# Altium footprint library Connectors.PcbLib: 305 footprints (part 9 of 20)
Each footprint in its own frame and in the unit in brackets; x right, y up, seen from the top. Pads: shape width x height; smd on the part's side, far side on the other; paste and mask are expansions set on the pad; w line width, h text height; cw(c..) or ccw(c..) is an arc to the next point about the centre after c.
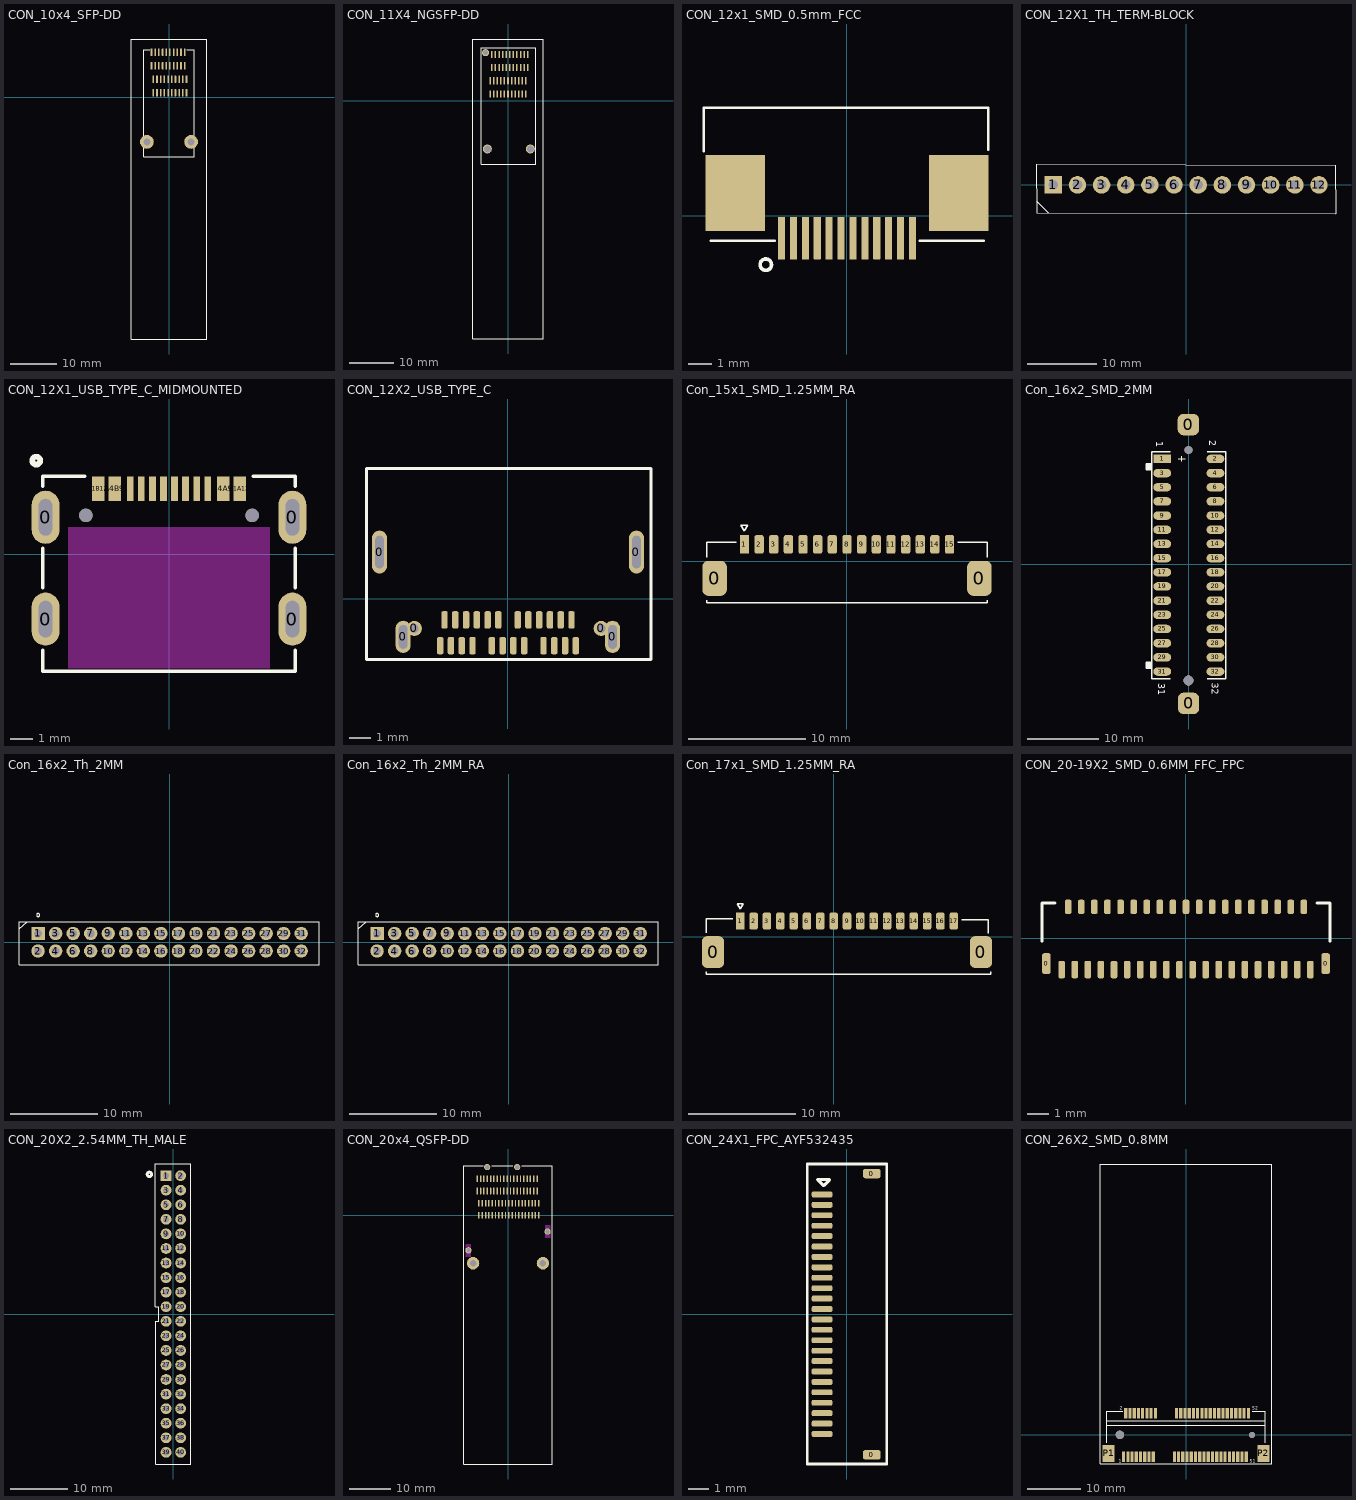
[diagram p8: the footprints below, top view; thin cyan lines are the x and y axes]

## CON_10x4_SFP-DD [mm] "/20220602/V-A.Patino"
pads (42):
  rrect50% 0.35x1.6 smd: 1(-3.4,0.93) 2(-2.6,0.93) 3(-1.8,0.93) 4(-1,0.93) 5(-0.2,0.93) 6(0.6,0.93) 7(1.4,0.93) 8(2.2,0.93) 9(3,0.93) 10(3.8,0.93) 11(3.4,9.72) 12(2.6,9.72) 13(1.8,9.72) 14(1,9.72) 15(0.2,9.72) 16(-0.6,9.72) 17(-1.4,9.72) 18(-2.2,9.72) 19(-3,9.72) 20(-3.8,9.72) 21(-3.4,3.86) 22(-2.6,3.86) 23(-1.8,3.86) 24(-1,3.86) 25(-0.2,3.86) 26(0.6,3.86) 27(1.4,3.86) 28(2.2,3.86) 29(3,3.86) 30(3.8,3.86) 31(3.4,6.79) 32(2.6,6.79) 33(1.8,6.79) 34(1,6.79) 35(0.2,6.79) 36(-0.6,6.79) 37(-1.4,6.79) 38(-2.2,6.79) 39(-3,6.79) 40(-3.8,6.79)
  round 3 hole 1.55: ""(-4.8,-9.72) ""(4.8,-9.72)
Top Overlay:
  lines w0.152: -5.5,-12.92 -5.5,10.29 -4.2,10.29 ; -5.495,-12.925 5.5,-12.925 ; 3.865,10.29 5.5,10.29 5.5,-12.92 ; -8.2,-52.5 -8.2,12.6 8.2,12.6 8.2,-52.5 -8.2,-52.5
3D body "c-2325864-1-10-3d.stp": height 7.37, standoff -1, extent -5.5,-12.925 5.5,10.435
3D body "c-2335809-1-a-3d.stp": height 11.86, standoff -2.04, extent -8.174,-52.497 8.174,12.578

## CON_11X4_NGSFP-DD [mm] "20220602 / E.Naranjo"
pads (47):
  rrect50% 0.35x1.6 smd: 1(-3.2,1.55) 2(-2.4,1.55) 3(-1.6,1.55) 4(-0.8,1.55) 5(0,1.55) 6(0.8,1.55) 7(1.6,1.55) 8(2.4,1.55) 9(3.2,1.55) 10(4,1.55) 11(3.6,10.34) 12(2.8,10.34) 13(2,10.34) 14(1.2,10.34) 15(0.4,10.34) 16(-0.4,10.34) 17(-1.2,10.34) 18(-2,10.34) 19(-2.8,10.34) 20(-3.6,10.34) 21(4.4,10.34) 22(-4,1.55) 23(-4,4.48) 24(-3.2,4.48) 25(-2.4,4.48) 26(-1.6,4.48) 27(-0.8,4.48) 28(0,4.48) 29(0.8,4.48) 30(1.6,4.48) 31(2.4,4.48) 32(3.2,4.48) 33(4,4.48) 34(3.6,7.41) 35(2.8,7.41) 36(2,7.41) 37(1.2,7.41) 38(0.4,7.41) 39(-0.4,7.41) 40(-1.2,7.41) 41(-2,7.41) 42(-2.8,7.41) 43(-3.6,7.41) 44(4.4,7.41)
  round 1.6 hole 1.15: ""(-5,10.75)
  round 2 hole 1.55: ""(-4.6,-10.75) ""(5,-10.75)
Top Overlay:
  lines w0.127: -6,-14.212 -6,11.8 6.2,11.8 6.2,-14.212 -6,-14.212
  lines w0.152: -7.9,-53.2 -7.9,13.8 7.9,13.8 7.9,-53.2 -7.9,-53.2
3D body "A120938-001-A.STEP": height 6.8, standoff -1.1, extent -5.53,-13.8 5.97,11.4
3D body "A121028-001-A (1).STEP": height 11.76, standoff -1.99, extent -7.91,-53.18 7.91,13.745

## CON_12x1_SMD_0.5mm_FCC [mm] "/ 20200612 / J-E.Pachon"
pads (14):
  rrect20% 0.3x1.8 smd mask+0.076: 1(-2.75,-0.95) 2(-2.25,-0.95) 3(-1.75,-0.95) 4(-1.25,-0.95) 5(-0.75,-0.95) 6(-0.25,-0.95) 7(0.25,-0.95) 8(0.75,-0.95) 9(1.25,-0.95) 10(1.75,-0.95) 11(2.25,-0.95) 12(2.75,-0.95)
  rect 2.5x3.2 smd: ""(-4.7,0.95) ""(4.7,0.95)
Top Overlay:
  circle w0.152: c-3.411,-2.062 r0.24
  lines w0.102: -6.013,2.708 -6.013,4.536 5.925,4.536 5.925,2.758 ; -5.734,-1.052 -3.041,-1.052 ; 3.055,-1.052 5.747,-1.052
3D body "545481271.stp": height 1.17, standoff -0.03, extent -5.597,-1.064 5.603,3.936

## CON_12X1_TH_TERM-BLOCK [mm] "/20220603/F-A.Ospina"
pads (12):
  rect 2.54x2.54 hole 1.397: 1(-19.25,0)
  round 2.54 hole 1.397: 2(-15.75,0) 3(-12.25,0) 4(-8.75,0) 5(-5.25,0) 6(-1.75,0) 7(1.75,0) 8(5.25,0) 9(8.75,0) 10(12.25,0) 11(15.75,0) 12(19.25,0)
Top Overlay:
  lines w0.127: -21.699,-2.307 -19.964,-4.034 ; -21.757,2.953 21.643,2.85 21.719,-4.15 -21.68,-4.046 -21.757,2.953
3D body "395011012.stp": height 9.16, standoff -3.54, extent -21.704,-4 21.704,2.858

## CON_12X1_USB_TYPE_C_MIDMOUNTED [mm] "/20211001/N-A.Potosi"
pads (18):
  oval 1.25x2.4 hole 0.6 slot 1.65 at 90 deg mask+0: 0(-5.575,-2.94) 0(-5.575,1.66) 0(5.575,-2.94) 0(5.575,1.66)
  rect 0.559x1.1 smd paste+0 mask+0: A1B12(-3.2,2.94) A4B9(-2.45,2.94) B1A12(3.2,2.94) B4A9(2.45,2.94)
  rect 0.305x1.1 smd paste+0 mask+0: A5(-1.25,2.94) A6(-0.25,2.94) A7(0.25,2.94) A8(1.25,2.94) B5(1.75,2.94) B6(0.75,2.94) B7(-0.75,2.94) B8(-1.75,2.94)
  round 0.61 hole 0.61 unplated: ""(-3.75,1.74) ""(3.75,1.74)
Top Overlay:
  circle w0.254: c-5.994,4.216 r0.18
  lines w0.152: -5.702,-4.343 -5.702,-5.297 5.702,-5.297 5.702,-4.343 ; -5.702,-1.537 -5.702,0.257 ; -5.702,3.063 -5.702,3.517 -3.811,3.517 ; 3.811,3.517 5.702,3.517 5.702,3.063 ; 5.702,-1.537 5.702,0.257
Keep-Out Layer:
  board cut-out: -4.547,1.21 -4.547,-5.17 4.547,-5.17 4.547,1.21
3D body "User Library-TYPE-C-31-M-14.step": height 1.99, standoff -1.17, extent -5.71,-5.185 5.764,3.395

## CON_12X2_USB_TYPE_C [mm] "/20210106/J-E.Pachon"
pads (30):
  oval 0.7x2 hole 0.4 slot 1.5 at 90 deg: 0(-5.97,2.175) 0(5.97,2.175)
  oval 0.7x1.5 hole 0.4 slot 1.1 at 90 deg: 0(-4.87,-1.765) 0(4.86,-1.765)
  round 0.7 hole 0.4: 0(-4.35,-1.375) 0(4.33,-1.375)
  rrect50% 0.3x0.8 smd: A1(-2.95,-0.975) A2(-2.45,-0.975) A3(-1.95,-0.975) A4(-1.45,-0.975) A5(-0.95,-0.975) A6(-0.45,-0.975) A7(0.45,-0.975) A8(0.95,-0.975) A9(1.45,-0.975) A10(1.95,-0.975) A11(2.45,-0.975) A12(2.95,-0.975) B1(3.15,-2.175) B2(2.65,-2.175) B3(2.15,-2.175) B4(1.65,-2.175) B5(0.75,-2.175) B6(0.25,-2.175) B7(-0.25,-2.175) B8(-0.75,-2.175) B9(-1.65,-2.175) B10(-2.15,-2.175) B11(-2.65,-2.175) B12(-3.15,-2.175)
Top Overlay:
  lines w0.127: -6.57,-2.815 -6.57,6.055 6.64,6.055 6.64,-2.815 -6.57,-2.815
3D body "12401903.stp": height 2.57, standoff -1.73, extent -6.1,-2.495 6.1,5.847

## Con_15x1_SMD_1.25MM_RA [mm] "/20230802/J-A.Sepulveda"
pads (17):
  rrect50% 2.1x3 smd: 0(-11.3,-1.45) 0(11.3,-1.45)
  rect 0.8x1.6 smd: 1(-8.75,1.45)
  rrect50% 0.8x1.6 smd: 2(-7.5,1.45) 3(-6.25,1.45) 4(-5,1.45) 5(-3.75,1.45) 6(-2.5,1.45) 7(-1.25,1.45) 8(0,1.45) 9(1.25,1.45) 10(2.5,1.45) 11(3.75,1.45) 12(5,1.45) 13(6.25,1.45) 14(7.5,1.45) 15(8.75,1.45)
Top Overlay:
  lines w0.127: -11.95,-3.3 -11.95,-3.55 11.95,-3.55 11.95,-3.3 ; -11.95,0.35 -11.95,1.65 -9.47,1.65 ; 9.47,1.65 11.95,1.65 11.95,0.35 ; -9.05,3.1 -8.75,2.6 -8.45,3.1 -9.05,3.1
3D body "53261-1571.stp": height 3.41, standoff 0.01, extent -11.95,-3.254 11.95,1.946

## Con_16x2_SMD_2MM [mm] "/20220629/F-A.Ospina"
pads (34):
  rrect50% 3x3 smd mask+0.102: 0(-0.068,19.665) 0(-0.04,-19.665)
  rect 2.5x1.2 smd: 1(-3.75,14.83)
  oval 2.5x1.2 smd: 2(3.75,14.83) 3(-3.75,12.83) 4(3.75,12.83) 5(-3.75,10.83) 6(3.75,10.83) 7(-3.75,8.83) 8(3.75,8.83) 9(-3.75,6.83) 10(3.75,6.83) 11(-3.75,4.83) 12(3.75,4.83) 13(-3.75,2.83) 14(3.75,2.83) 15(-3.75,0.83) 16(3.75,0.83) 17(-3.75,-1.17) 18(3.75,-1.17) 19(-3.75,-3.17) 20(3.75,-3.17) 21(-3.75,-5.17) 22(3.75,-5.17) 23(-3.75,-7.17) 24(3.75,-7.17) 25(-3.75,-9.17) 26(3.75,-9.17) 27(-3.75,-11.17) 28(3.75,-11.17) 29(-3.75,-13.17) 30(3.75,-13.17) 31(-3.75,-15.17) 32(3.75,-15.17)
via -0.042,16.1 diameter 1.1 hole 1.1
via -0.042,-16.412 diameter 1.4 hole 1.4
Top Overlay:
  rectangle: -6.011,-14.685 -5.249,-13.872
  rectangle: -6.036,13.306 -5.249,14.144
  lines w0.1: -1.49,14.83 -0.53,14.83 ; -1,14.47 -1,15.19
  lines w0.2: -6.036,-14.685 -6.036,-13.897 -6.011,-13.872 -5.25,-13.872 ; -6.035,-14.685 -5.249,-14.685 ; -5.25,14.144 -6.036,14.144 -6.036,13.306 -5.249,13.306 ; -2.63,-16.2 -5.25,-16.2 -5.25,15.83 -2.63,15.83 ; 2.61,-16.2 5.23,-16.2 5.23,15.83 2.61,15.83
  text "32" at 3.24,-16.75 h1
  text "31" at -4.34,-16.85 h1
  text "2" at 2.91,17.48 h1
  text "1" at -4.6,17.33 h1
3D body "DF11Z-32DS-2V(20).STEP": height 5.95, standoff -1, extent -4.041,-19.906 3.959,19.594

## Con_16x2_Th_2MM [mm] "/20220519/F-A.Ospina"
pads (32):
  rect 1.53x1.53 hole 0.889: 1(-15,1)
  round 1.53 hole 0.889: 2(-15,-1) 3(-13,1) 4(-13,-1) 5(-11,1) 6(-11,-1) 7(-9,1) 8(-9,-1) 9(-7,1) 10(-7,-1) 11(-5,1) 12(-5,-1) 13(-3,1) 14(-3,-1) 15(-1,1) 16(-1,-1) 17(1,1) 18(1,-1) 19(3,1) 20(3,-1) 21(5,1) 22(5,-1) 23(7,1) 24(7,-1) 25(9,1) 26(9,-1) 27(11,1) 28(11,-1) 29(13,1) 30(13,-1) 31(15,1) 32(15,-1)
Top Overlay:
  circle w0.127: c-15,3.1 r0.18
  lines w0.127: -17.175,1.541 -16.217,2.36 ; -17.175,-2.54 17.025,-2.54 17.025,2.36 -17.175,2.36 -17.175,-2.54
3D body "DF11-32DS-2DSA.stp": height 5.71, standoff -3.49, extent -16.988,-2.528 17.012,2.472

## Con_16x2_Th_2MM_RA [mm] "/20220519/F-A.Ospina"
pads (32):
  rect 1.53x1.53 hole 0.889: 1(-15,1)
  round 1.53 hole 0.889: 2(-15,-1) 3(-13,1) 4(-13,-1) 5(-11,1) 6(-11,-1) 7(-9,1) 8(-9,-1) 9(-7,1) 10(-7,-1) 11(-5,1) 12(-5,-1) 13(-3,1) 14(-3,-1) 15(-1,1) 16(-1,-1) 17(1,1) 18(1,-1) 19(3,1) 20(3,-1) 21(5,1) 22(5,-1) 23(7,1) 24(7,-1) 25(9,1) 26(9,-1) 27(11,1) 28(11,-1) 29(13,1) 30(13,-1) 31(15,1) 32(15,-1)
Top Overlay:
  circle w0.127: c-15,3.1 r0.18
  lines w0.102: -17.175,1.541 -16.217,2.36 ; -17.175,-2.54 -17.175,2.36 17.025,2.36 17.025,-2.54 -17.175,-2.54
3D body "DF11-32DP-2DS(24)--3DModel-STEP-1.STEP": height 5.01, standoff -2.99, extent -16.981,-8.694 17.019,1.306

## Con_17x1_SMD_1.25MM_RA [mm] "/20230824/J-E.Pachon"
pads (19):
  rrect50% 2.1x3 smd: 0(-11.3,-1.45) 0(13.8,-1.45)
  rect 0.8x1.6 smd: 1(-8.75,1.45)
  rrect50% 0.8x1.6 smd: 2(-7.5,1.45) 3(-6.25,1.45) 4(-5,1.45) 5(-3.75,1.45) 6(-2.5,1.45) 7(-1.25,1.45) 8(0,1.45) 9(1.25,1.45) 10(2.5,1.45) 11(3.75,1.45) 12(5,1.45) 13(6.25,1.45) 14(7.5,1.45) 15(8.75,1.45) 16(10,1.45) 17(11.25,1.45)
Top Overlay:
  lines w0.127: -11.95,-3.3 -11.95,-3.55 14.696,-3.55 14.696,-3.3 ; -11.95,0.35 -11.95,1.65 -9.47,1.65 ; 12.02,1.6 14.5,1.6 14.5,0.3 ; -9.05,3.1 -8.75,2.6 -8.45,3.1 -9.05,3.1
3D body "532611771.stp": height 3.21, standoff -0.19, extent -11.946,-3.402 14.454,1.798

## CON_20-19X2_SMD_0.6MM_FFC_FPC [mm] "20230728 / E.Naranjo"
pads (41):
  rrect50% 0.4x0.95 smd mask+0.102: 0(-6.4,-1.162) 0(6.4,-1.162)
  rrect50% 0.3x0.8 smd mask+0.102: 1(-5.7,-1.438) 3(-5.1,-1.438) 5(-4.5,-1.438) 7(-3.9,-1.438) 9(-3.3,-1.438) 11(-2.7,-1.438) 13(-2.1,-1.438) 15(-1.5,-1.438) 17(-0.9,-1.438) 19(-0.3,-1.438) 21(0.3,-1.438) 23(0.9,-1.438) 25(1.5,-1.438) 27(2.1,-1.438) 29(2.7,-1.438) 31(3.3,-1.438) 33(3.9,-1.438) 35(4.5,-1.438) 37(5.1,-1.438) 39(5.7,-1.438)
  rrect50% 0.3x0.65 smd mask+0.102: 2(-5.4,1.438) 4(-4.8,1.438) 6(-4.2,1.438) 8(-3.6,1.438) 10(-3,1.438) 12(-2.4,1.438) 14(-1.8,1.438) 16(-1.2,1.438) 18(-0.6,1.438) 20(0,1.438) 22(0.6,1.438) 24(1.2,1.438) 26(1.8,1.438) 28(2.4,1.438) 30(3,1.438) 32(3.6,1.438) 34(4.2,1.438) 36(4.8,1.438) 38(5.4,1.438)
Top Overlay:
  lines w0.127: -6.6,-0.137 -6.6,1.613 -6,1.613 ; 6,1.613 6.6,1.613 6.6,-0.137
3D body "FH26-39S-0.3SHW.stp": height 1, standoff 0, extent -6.6,-1.887 6.6,1.613

## CON_20X2_2.54MM_TH_MALE [mil] "/20230220/N-A.Potosi"
pads (40):
  rect 74x74 hole 40: 1(-50,950)
  round 74 / inner round 0 / far side round 74 hole 40: 2(50,950) 3(-50,850) 4(50,850) 5(-50,750) 6(50,750) 7(-50,650) 8(50,650) 9(-50,550) 10(50,550) 11(-50,450) 12(50,450) 13(-50,350) 14(50,350) 15(-50,250) 16(50,250) 17(-50,150) 18(50,150) 19(-50,50) 20(50,50) 21(-50,-50) 22(50,-50) 23(-50,-150) 24(50,-150) 25(-50,-250) 26(50,-250) 27(-50,-350) 28(50,-350) 29(-50,-450) 30(50,-450) 31(-50,-550) 32(50,-550) 33(-50,-650) 34(50,-650) 35(-50,-750) 36(50,-750) 37(-50,-850) 38(50,-850) 39(-50,-950) 40(50,-950)
Top Overlay:
  circle w20: c-164.54,958.83 r15
  lines w5: -125,50 -100,50 -100,-50 -120,-50 -120,-1030 120,-1030 120,1030 -125,1030 -125,50
Bottom Overlay:
  circle w20: c-164.54,958.83 r15
3D body "20X2HDR61204021621_Download_STP_61204021621_rev1.stp": height 351.38, standoff -125, extent -174.22,-1150.79 187,1150.78

## CON_20x4_QSFP-DD [mm] "/20220601/V-A.Patino"
pads (82):
  rrect50% 0.35x1.6 smd: 1(-7,-0.05) 2(-6.2,-0.05) 3(-5.4,-0.05) 4(-4.6,-0.05) 5(-3.8,-0.05) 6(-3,-0.05) 7(-2.2,-0.05) 8(-1.4,-0.05) 9(-0.6,-0.05) 10(0.2,-0.05) 11(1,-0.05) 12(1.8,-0.05) 13(2.6,-0.05) 14(3.4,-0.05) 15(4.2,-0.05) 16(5,-0.05) 17(5.8,-0.05) 18(6.6,-0.05) 19(7.4,-0.05) 20(7,8.74) 21(6.2,8.74) 22(5.4,8.74) 23(4.6,8.74) 24(3.8,8.74) 25(3,8.74) 26(2.2,8.74) 27(1.4,8.74) 28(0.6,8.74) 29(-0.2,8.74) 30(-1,8.74) 31(-1.8,8.74) 32(-2.6,8.74) 33(-3.4,8.74) 34(-4.2,8.74) 35(-5,8.74) 36(-5.8,8.74) 37(-6.6,8.74) 38(-7.4,8.74) 39(-7,2.88) 40(-6.2,2.88) 41(-5.4,2.88) 42(-4.6,2.88) 43(-3.8,2.88) 44(-3,2.88) 45(-2.2,2.88) 46(-1.4,2.88) 47(-0.6,2.88) 48(0.2,2.88) 49(1,2.88) 50(1.8,2.88) 51(2.6,2.88) 52(3.4,2.88) 53(4.2,2.88) 54(5,2.88) 55(5.8,2.88) 56(6.6,2.88) 57(7.4,2.88) 58(7,5.81) 59(6.2,5.81) 60(5.4,5.81) 61(4.6,5.81) 62(3.8,5.81) 63(3,5.81) 64(2.2,5.81) 65(1.4,5.81) 66(0.6,5.81) 67(-0.2,5.81) 68(-1,5.81) 69(-1.8,5.81) 70(-2.6,5.81) 71(-3.4,5.81) 72(-4.2,5.81) 73(-5,5.81) 74(-5.8,5.81) 75(-6.6,5.81) 76(-7.4,5.81)
  round 1.5 hole 1.05: ""(-9.5,-8.45) ""(-5,11.55) ""(2.2,11.55) ""(9.5,-3.95)
  round 3 hole 1.55 unplated: ""(-8.4,-11.55) ""(8.4,-11.55)
Top Overlay:
  lines w0.127: -5.975,11.9 -10.6,11.9 -10.6,-59.8 10.6,-59.8 10.6,11.9 3.312,11.9 ; -3.888,11.9 1.087,11.9
Keep-Out Layer:
  region: 10.1,-5.45 10.1,-2.45 8.9,-2.45 8.9,-5.45
  region: -10.1,-9.95 -10.1,-6.95 -8.9,-6.95 -8.9,-9.95
3D body "M-UE36-A1070-X000T_REVTF.STEP": height 7.91, standoff -0.94, extent -9.4,-13.975 9.4,9.975
3D body "c-2342933-1-b-3d.stp": height 12.7, standoff -2.34, extent -10.601,-59.765 10.601,11.9

## CON_24X1_FPC_AYF532435 [mil] "/20200625/N-A.Potosi"
pads (26):
  rrect50% 33.46x17.72 smd: 0(47.03,-265.75) 0(47.03,265.75)
  rrect50% 39x11 smd: 1(-47.03,226.38) 2(-47.03,206.69) 3(-47.03,187.01) 4(-47.03,167.32) 5(-47.03,147.64) 6(-47.03,127.95) 7(-47.03,108.27) 8(-47.03,88.58) 9(-47.03,68.9) 10(-47.03,49.21) 11(-47.03,29.53) 12(-47.03,9.84) 13(-47.03,-9.84) 14(-47.03,-29.53) 15(-47.03,-49.21) 16(-47.03,-68.9) 17(-47.03,-88.58) 18(-47.03,-108.27) 19(-47.03,-127.95) 20(-47.03,-147.64) 21(-47.03,-167.32) 22(-47.03,-187.01) 23(-47.03,-206.69) 24(-47.03,-226.38)
Top Overlay:
  lines w5: -74.7,-283.1 -74.7,283.92 75.02,283.92 75.02,-283.1 -74.7,-283.1
  lines w6: -55.39,254.43 -32.76,254.43 -44.07,243.11 -55.39,254.43
3D body "ayf532435-closed.step": height 39.87, standoff 0.5, extent -73.6,-276.57 72.07,274.61

## CON_26X2_SMD_0.8MM [mm] "/20210224/J-E.Pachon"
pads (56):
  rect 0.6x2 smd: 1(-11.8,-4.1) 2(-11.4,4.1) 3(-11,-4.1) 4(-10.6,4.1) 5(-10.2,-4.1) 6(-9.8,4.1) 7(-9.4,-4.1) 8(-9,4.1) 9(-8.6,-4.1) 10(-8.2,4.1) 11(-7.8,-4.1) 12(-7.4,4.1) 13(-7,-4.1) 14(-6.6,4.1) 15(-6.2,-4.1) 16(-5.8,4.1) 17(-2.2,-4.1) 18(-1.8,4.1) 19(-1.4,-4.1) 20(-1,4.1) 21(-0.6,-4.1) 22(-0.2,4.1) 23(0.2,-4.1) 24(0.6,4.1) 25(1,-4.1) 26(1.4,4.1) 27(1.8,-4.1) 28(2.2,4.1) 29(2.6,-4.1) 30(3,4.1) 31(3.4,-4.1) 32(3.8,4.1) 33(4.2,-4.1) 34(4.6,4.1) 35(5,-4.1) 36(5.4,4.1) 37(5.8,-4.1) 38(6.2,4.1) 39(6.6,-4.1) 40(7,4.1) 41(7.4,-4.1) 42(7.8,4.1) 43(8.2,-4.1) 44(8.6,4.1) 45(9,-4.1) 46(9.4,4.1) 47(9.8,-4.1) 48(10.2,4.1) 49(10.6,-4.1) 50(11,4.1) 51(11.4,-4.1) 52(11.8,4.1)
  rect 2.3x3.2 smd: P1(-14.65,-3.5) P2(14.65,-3.5)
  round 1.6 hole 1.6 unplated: ""(-12.5,0)
  round 1.1 hole 1.1 unplated: ""(12.5,0)
Top Overlay:
  lines w0.127: -16.252,-5.503 16.248,-5.503 16.248,51.247 -16.252,51.247 -16.252,-5.503
  lines w0.2: -15,-1.5 -15,4.5 -12,4.5 ; -15,1.86 15,1.86 ; -15,2.71 15,2.71 ; 12.5,4.5 15,4.5 15,-1.5
  text "1" at -12.752,-5.251 h0.61
  text "51" at 12.013,-5.256 h0.61
  text "52" at 12.518,4.757 h0.61
  text "2" at -12.519,4.757 h0.61
3D body "1775862-2.stp": height 5.16, standoff -0.69, extent -14.95,-4.57 14.95,4.51